# Altium schematic symbol library LMR10510XMFE_NOPB.SchLib: 1 symbol
Pins are listed as number, name and electrical type; pins without a type are passive.

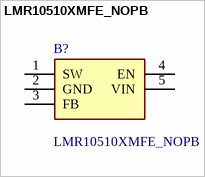
[diagram p0: symbol LMR10510XMFE_NOPB]

## LMR10510XMFE_NOPB
designator B?
Texas Instruments LMR10510XMFE/NOPB, Buck Converter, 1A, 5.5 V, Step Down, 1.95 MHz, 5-Pin, SOT-23; Geometry.Height: 1.45mm; Manufacturer_Name: Texas Instruments; Manufacturer_Part_Number: LMR10510XMFE/NOPB; Mouser Part Number: 926-LMR10510XMFENOPB; Mouser Price/Stock: https://www.mouser.co.uk/ProductDetail/Texas-Instruments/LMR10510XMFE-NOPB?qs=cN01o9PeIQt6Gu2gtl1ODA%3D%3D; Arrow Part Number: LMR10510XMFE/NOPB; Arrow Price/Stock: https://www.arrow.com/en/products/lmr10510xmfenopb/texas-instruments?region=nac; Datasheet Link: http://www.ti.com/lit/gpn/lmr10510
footprint SOT95P280X145-5N
pins: 1 SW, 2 GND, 3 FB, 4 EN, 5 VIN